# EAGLE library part BME280 (library astra)
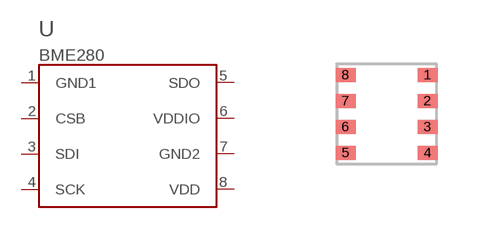
[diagram p12: symbol with the pads of BOSCH_BME280; footprint BOSCH_BME280]

Designator prefix U

## BME280  [BOSCH_BME280]
1  GND1  pwr
2  CSB  in
3  SDI
4  SCK  in
5  SDO
6  VDDIO  pwr
7  GND2  pwr
8  VDD  pwr

## Footprint BOSCH_BME280 (pad centres in mm)
Bosch BST-BME280-DS001-24 Fig. 21. Clockwise numbering in top view. Pin 1 UPPER RIGHT, next to vent.
smd 0.5 x 0.35: 1 1.025,0.975; 2 1.025,0.325; 3 1.025,-0.325; 4 1.025,-0.975; 5 -1.025,-0.975; 6 -1.025,-0.325; 7 -1.025,0.325; 8 -1.025,0.975